# Altium footprint library SamacSys.PcbLib: 8 footprints
Each footprint in its own frame and in the unit in brackets; x right, y up, seen from the top. Pads: shape width x height; smd on the part's side, far side on the other; paste and mask are expansions set on the pad; w line width, h text height; cw(c..) or ccw(c..) is an arc to the next point about the centre after c.
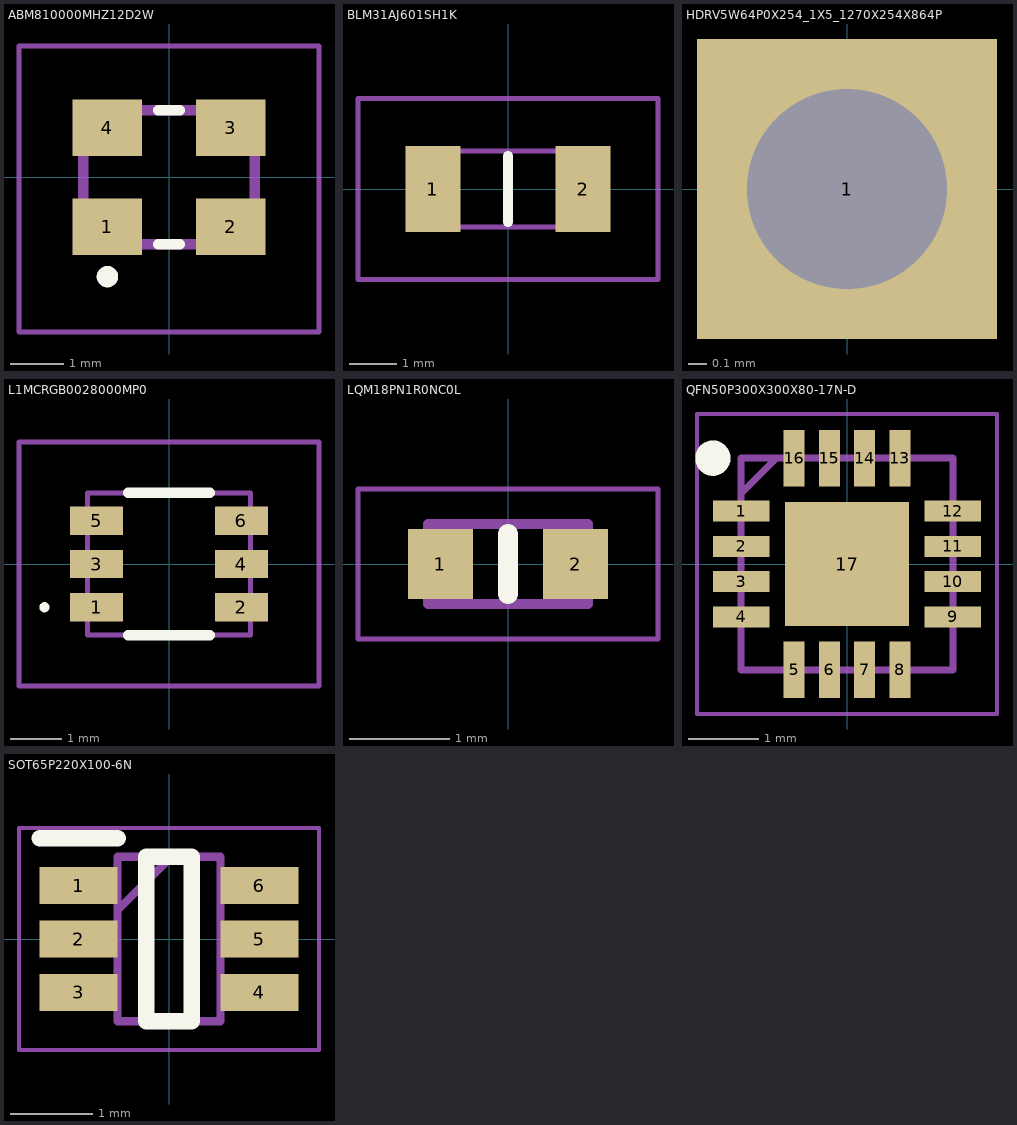
[diagram p0: the footprints below, top view; thin cyan lines are the x and y axes]

## ABM810000MHZ12D2W [mm]
pads (4):
  rect 1.3x1.05 smd: 1(-1.15,-0.925) 2(1.15,-0.925) 3(1.15,0.925) 4(-1.15,0.925)
Top Overlay:
  lines w0.2: -0.2,-1.25 0.2,-1.25 ; -0.2,1.25 0.2,1.25 ; -1.25,-1.854 ccw(c-1.15,-1.854) -1.05,-1.854 ccw(c-1.15,-1.854) -1.25,-1.854
Mechanical 13:
  lines w0.2: -1.6,-1.25 1.6,-1.25 1.6,1.25 -1.6,1.25 -1.6,-1.25
Mechanical 15:
  lines w0.1: -2.8,-2.887 2.8,-2.887 2.8,2.45 -2.8,2.45 -2.8,-2.887
3D body "ABM8-26.000MHZ-10-1-U-T.stp": height 0.8, standoff 0, extent -1.6,-1.25 1.6,1.25

## BLM31AJ601SH1K [mm]
pads (2):
  rect 1.15x1.8 smd: 1(-1.575,0) 2(1.575,0)
Top Overlay:
  lines w0.2: 0,-0.7 0,0.7
Mechanical 13:
  lines w0.1: -1.6,-0.8 1.6,-0.8 1.6,0.8 -1.6,0.8 -1.6,-0.8
Mechanical 15:
  lines w0.1: -3.15,-1.9 3.15,-1.9 3.15,1.9 -3.15,1.9 -3.15,-1.9
3D body "BLM31SN500SZ1L.stp": height 1.1, standoff 0, extent -1.6,-0.8 1.6,0.8

## HDRV5W64P0X254_1X5_1270X254X864P [mm]
pads (1):
  rect 1.65x1.65 hole 1.1: 1(0,0)

## L1MCRGB0028000MP0 [mm]
pads (6):
  rect 1.05x0.56 smd: 1(-1.425,-0.85) 2(1.425,-0.85) 3(-1.425,0) 4(1.425,0) 5(-1.425,0.85) 6(1.425,0.85)
Top Overlay:
  lines w0.1: -2.5,-0.85 cw(c-2.45,-0.85) -2.4,-0.85 cw(c-2.45,-0.85) -2.5,-0.85
  lines w0.2: -0.8,-1.4 0.8,-1.4 ; -0.8,1.4 0.8,1.4
Mechanical 13:
  lines w0.1: -1.6,-1.4 -1.6,1.4 1.6,1.4 1.6,-1.4 -1.6,-1.4
Mechanical 15:
  lines w0.1: -2.95,-2.4 -2.95,2.4 2.95,2.4 2.95,-2.4 -2.95,-2.4
3D body "L1MC-RGB0028000MP0.stp": height 1.95, standoff 0, extent -1.6,-1.4 1.6,1.4

## LQM18PN1R0NC0L [mm]
pads (2):
  rect 0.65x0.7 smd: 1(-0.675,0) 2(0.675,0)
Top Overlay:
  lines w0.2: 0,-0.3 0,0.3
Mechanical 13:
  lines w0.1: -0.8,-0.4 -0.8,0.4 0.8,0.4 0.8,-0.4 -0.8,-0.4
Mechanical 15:
  lines w0.05: -1.5,-0.75 -1.5,0.75 1.5,0.75 1.5,-0.75 -1.5,-0.75
3D body "LQM18PN2R2NC0L.stp": height 0.5, standoff 0, extent -0.8,-0.4 0.8,0.4

## PCBComponent_1 [mm]

## QFN50P300X300X80-17N-D [mm]
pads (17):
  rect 0.8x0.3 smd: 1(-1.5,0.75) 2(-1.5,0.25) 3(-1.5,-0.25) 4(-1.5,-0.75) 9(1.5,-0.75) 10(1.5,-0.25) 11(1.5,0.25) 12(1.5,0.75)
  rect 0.3x0.8 smd: 5(-0.75,-1.5) 6(-0.25,-1.5) 7(0.25,-1.5) 8(0.75,-1.5) 13(0.75,1.5) 14(0.25,1.5) 15(-0.25,1.5) 16(-0.75,1.5)
  rect 1.75x1.75 smd: 17(0,0)
Top Overlay:
  circle w0.25: c-1.9,1.5 r0.125
Mechanical 13:
  lines w0.1: -1.5,1 -1,1.5 ; -1.5,-1.5 -1.5,1.5 1.5,1.5 1.5,-1.5 -1.5,-1.5
Mechanical 15:
  lines w0.05: -2.125,-2.125 -2.125,2.125 2.125,2.125 2.125,-2.125 -2.125,-2.125
3D body "CMT2300A.stp": height 0.8, standoff 0, extent -1.55,-1.55 1.55,1.55

## SOT65P220X100-6N [mm]
pads (6):
  rect 0.95x0.45 smd: 1(-1.1,0.65) 2(-1.1,0) 3(-1.1,-0.65) 4(1.1,-0.65) 5(1.1,0) 6(1.1,0.65)
Top Overlay:
  lines w0.2: -1.575,1.225 -0.625,1.225 ; -0.275,-1 -0.275,1 0.275,1 0.275,-1 -0.275,-1
Mechanical 13:
  lines w0.1: -0.625,0.35 0.025,1 ; -0.625,-1 -0.625,1 0.625,1 0.625,-1 -0.625,-1
Mechanical 15:
  lines w0.05: -1.825,-1.35 -1.825,1.35 1.825,1.35 1.825,-1.35 -1.825,-1.35
3D body "AS179-92LF.stp": height 1, standoff 0, extent -1.1,-1 1.1,1